# Altium footprint library 74系列芯片.PcbLib: 44 footprints (part 2 of 3)
Each footprint in its own frame and in the unit in brackets; x right, y up, seen from the top. Pads: shape width x height; smd on the part's side, far side on the other; paste and mask are expansions set on the pad; w line width, h text height; cw(c..) or ccw(c..) is an arc to the next point about the centre after c.
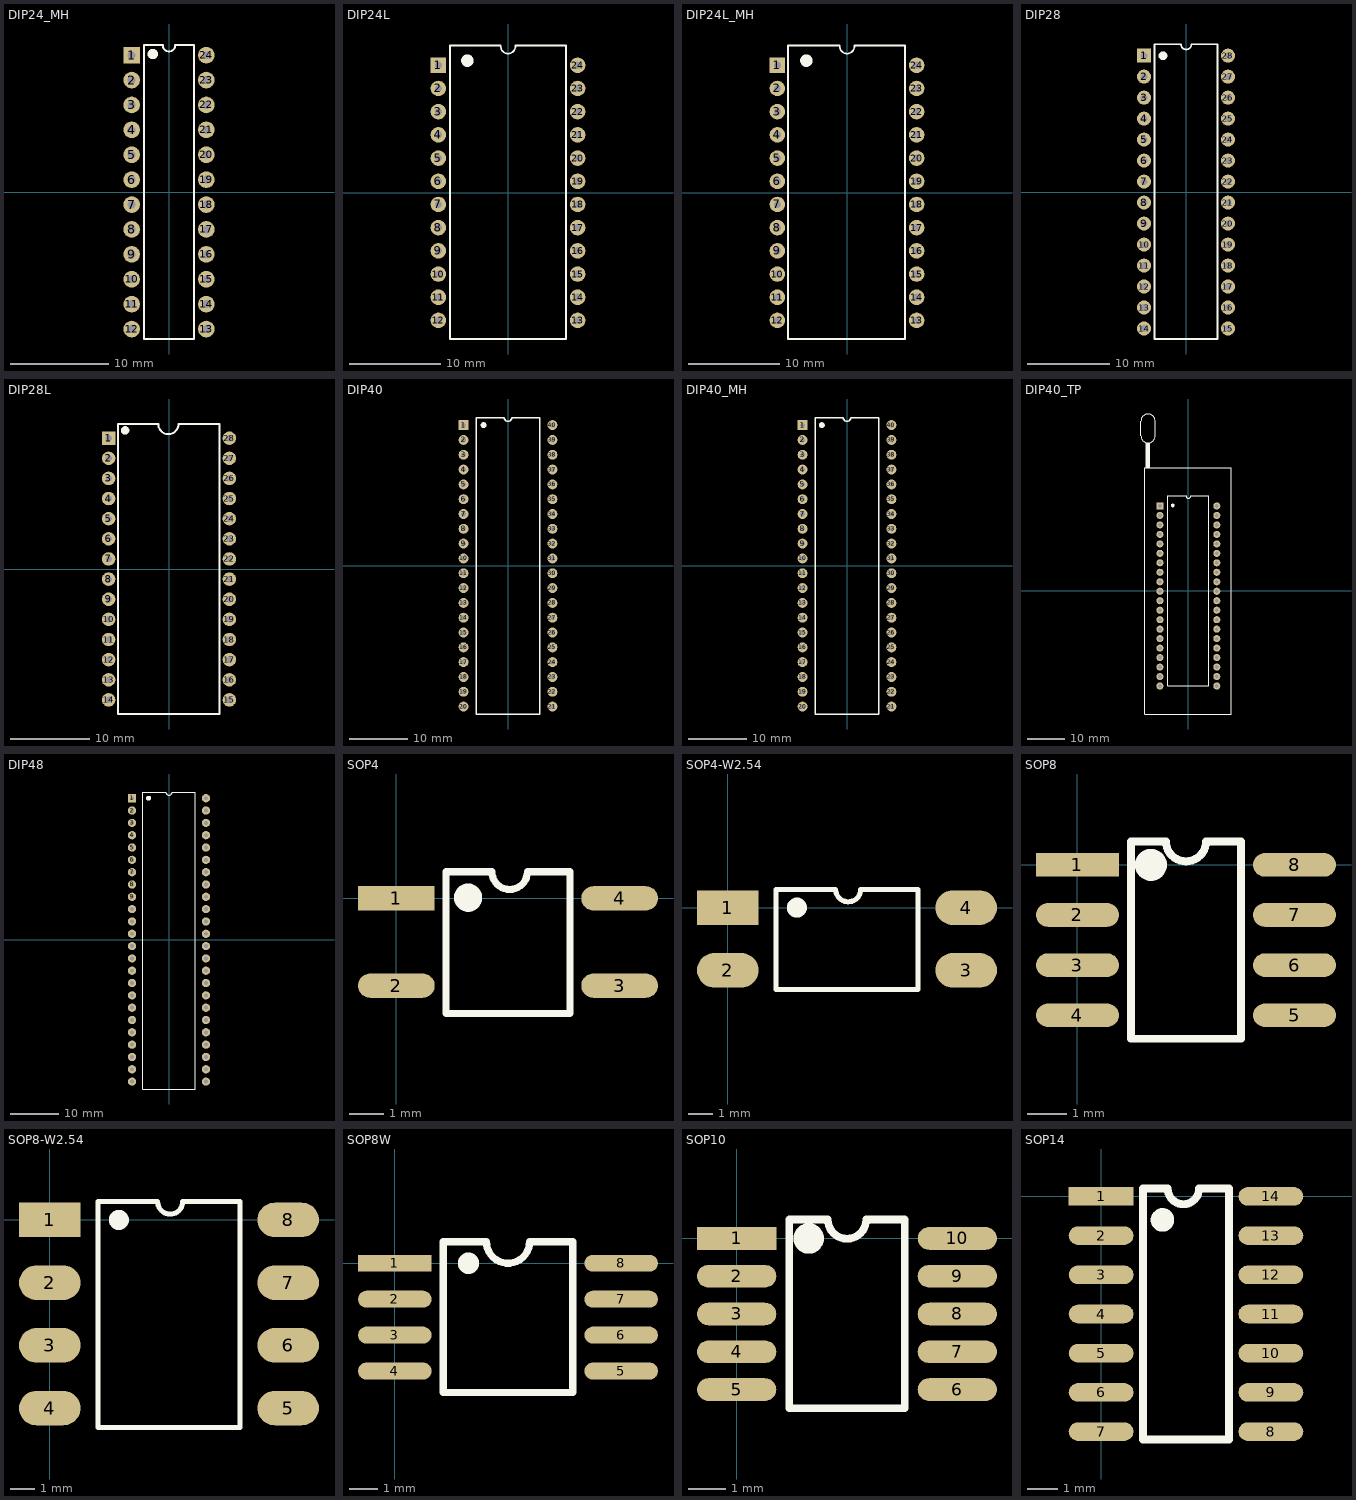
[diagram p1: the footprints below, top view; thin cyan lines are the x and y axes]

## DIP24_MH [mm]
pads (24):
  rect 1.7x1.7 hole 0.8: 1(-3.81,13.97)
  round 1.7 hole 0.8: 2(-3.81,11.43) 3(-3.81,8.89) 4(-3.81,6.35) 5(-3.81,3.81) 6(-3.81,1.27) 7(-3.81,-1.27) 8(-3.81,-3.81) 9(-3.81,-6.35) 10(-3.81,-8.89) 11(-3.81,-11.43) 12(-3.81,-13.97) 13(3.81,-13.97) 14(3.81,-11.43) 15(3.81,-8.89) 16(3.81,-6.35) 17(3.81,-3.81) 18(3.81,-1.27) 19(3.81,1.27) 20(3.81,3.81) 21(3.81,6.35) 22(3.81,8.89) 23(3.81,11.43) 24(3.81,13.97)
Top Overlay:
  circle w0.8: c-1.651,14.086 r0.127
  lines w0.2: -2.54,-14.986 2.54,-14.986 2.54,14.986 0.635,14.986 cw(c0,14.986) -0.635,14.986 -2.54,14.986 -2.54,-14.986
3D body "DIP24.STEP": height 7.85, standoff 0.04, extent -4,-15.633 4,15.367
3D body "DIP24_MH.STEP": height 4.95, standoff -3.05, extent -5.025,-15.506 5.025,15.494

## DIP24L [mm]
pads (24):
  rect 1.7x1.7 hole 0.8: 1(-7.62,13.97)
  round 1.7 hole 0.8: 2(-7.62,11.43) 3(-7.62,8.89) 4(-7.62,6.35) 5(-7.62,3.81) 6(-7.62,1.27) 7(-7.62,-1.27) 8(-7.62,-3.81) 9(-7.62,-6.35) 10(-7.62,-8.89) 11(-7.62,-11.43) 12(-7.62,-13.97) 13(7.62,-13.97) 14(7.62,-11.43) 15(7.62,-8.89) 16(7.62,-6.35) 17(7.62,-3.81) 18(7.62,-1.27) 19(7.62,1.27) 20(7.62,3.81) 21(7.62,6.35) 22(7.62,8.89) 23(7.62,11.43) 24(7.62,13.97)
Top Overlay:
  circle w1: c-4.445,14.478 r0.18
  lines w0.2: -0.796,16.121 ccw(c0.004,16.044) 0.803,16.134 ; -0.796,16.14 -6.35,16.14 -6.35,-16.002 6.35,-16.002 6.35,16.14 0.803,16.14
3D body "DIP24L.STEP": height 4.75, standoff -3.05, extent -7.713,-16.244 7.747,16.256

## DIP24L_MH [mm]
pads (24):
  rect 1.7x1.7 hole 0.8: 1(-7.62,13.97)
  round 1.7 hole 0.8: 2(-7.62,11.43) 3(-7.62,8.89) 4(-7.62,6.35) 5(-7.62,3.81) 6(-7.62,1.27) 7(-7.62,-1.27) 8(-7.62,-3.81) 9(-7.62,-6.35) 10(-7.62,-8.89) 11(-7.62,-11.43) 12(-7.62,-13.97) 13(7.62,-13.97) 14(7.62,-11.43) 15(7.62,-8.89) 16(7.62,-6.35) 17(7.62,-3.81) 18(7.62,-1.27) 19(7.62,1.27) 20(7.62,3.81) 21(7.62,6.35) 22(7.62,8.89) 23(7.62,11.43) 24(7.62,13.97)
Top Overlay:
  circle w1: c-4.445,14.478 r0.18
  lines w0.2: -0.796,16.121 ccw(c0.004,16.044) 0.803,16.134 ; -0.796,16.14 -6.46,16.14 -6.46,-16.002 6.35,-16.002 6.35,16.14 0.803,16.14
3D body "DIP24L.STEP": height 8.56, standoff 0.76, extent -7.73,-16.371 7.73,16.129
3D body "DIP24L_MH.STEP": height 4.95, standoff -3.05, extent -8.845,-15.506 8.845,15.494

## DIP28 [mm]
pads (28):
  rect 1.7x1.7 hole 0.8: 1(-5.08,16.51)
  round 1.7 hole 0.8: 2(-5.08,13.97) 3(-5.08,11.43) 4(-5.08,8.89) 5(-5.08,6.35) 6(-5.08,3.81) 7(-5.08,1.27) 8(-5.08,-1.27) 9(-5.08,-3.81) 10(-5.08,-6.35) 11(-5.08,-8.89) 12(-5.08,-11.43) 13(-5.08,-13.97) 14(-5.08,-16.51) 15(5.08,-16.51) 16(5.08,-13.97) 17(5.08,-11.43) 18(5.08,-8.89) 19(5.08,-6.35) 20(5.08,-3.81) 21(5.08,-1.27) 22(5.08,1.27) 23(5.08,3.81) 24(5.08,6.35) 25(5.08,8.89) 26(5.08,11.43) 27(5.08,13.97) 28(5.08,16.51)
Top Overlay:
  circle w0.8: c-2.794,16.51 r0.127
  lines w0.2: -3.81,-17.78 -3.81,17.893 -0.61,17.893 ccw(c0.025,17.893) 0.66,17.893 3.81,17.893 3.81,-17.78 -3.81,-17.78
3D body "DIP28.STEP": height 4.5, standoff -3.4, extent -5.153,-18.093 5.407,17.907

## DIP28L [mm]
pads (28):
  rect 1.7x1.7 hole 0.8: 1(-7.62,16.51)
  round 1.7 hole 0.8: 2(-7.62,13.97) 3(-7.62,11.43) 4(-7.62,8.89) 5(-7.62,6.35) 6(-7.62,3.81) 7(-7.62,1.27) 8(-7.62,-1.27) 9(-7.62,-3.81) 10(-7.62,-6.35) 11(-7.62,-8.89) 12(-7.62,-11.43) 13(-7.62,-13.97) 14(-7.62,-16.51) 15(7.62,-16.51) 16(7.62,-13.97) 17(7.62,-11.43) 18(7.62,-8.89) 19(7.62,-6.35) 20(7.62,-3.81) 21(7.62,-1.27) 22(7.62,1.27) 23(7.62,3.81) 24(7.62,6.35) 25(7.62,8.89) 26(7.62,11.43) 27(7.62,13.97) 28(7.62,16.51)
Top Overlay:
  circle w0.8: c-5.537,17.49 r0.127
  lines w0.254: -6.46,18.277 -6.46,-18.288 6.35,-18.288 6.35,18.288 1.185,18.288 cw(c-0.085,18.288) -1.355,18.288 -6.435,18.288
3D body "DIP28.STEP": height 4.7, standoff -3.2, extent -7.78,-18.631 7.78,18.669

## DIP40 [mm]
pads (40):
  rect 1.7x1.7 hole 0.8: 1(-7.62,24.13)
  round 1.7 hole 0.8: 2(-7.62,21.59) 3(-7.62,19.05) 4(-7.62,16.51) 5(-7.62,13.97) 6(-7.62,11.43) 7(-7.62,8.89) 8(-7.62,6.35) 9(-7.62,3.81) 10(-7.62,1.27) 11(-7.62,-1.27) 12(-7.62,-3.81) 13(-7.62,-6.35) 14(-7.62,-8.89) 15(-7.62,-11.43) 16(-7.62,-13.97) 17(-7.62,-16.51) 18(-7.62,-19.05) 19(-7.62,-21.59) 20(-7.62,-24.13) 21(7.62,-24.13) 22(7.62,-21.59) 23(7.62,-19.05) 24(7.62,-16.51) 25(7.62,-13.97) 26(7.62,-11.43) 27(7.62,-8.89) 28(7.62,-6.35) 29(7.62,-3.81) 30(7.62,-1.27) 31(7.62,1.27) 32(7.62,3.81) 33(7.62,6.35) 34(7.62,8.89) 35(7.62,11.43) 36(7.62,13.97) 37(7.62,16.51) 38(7.62,19.05) 39(7.62,21.59) 40(7.62,24.13)
Top Overlay:
  circle w0.508: c-4.191,24.13 r0.254
  lines w0.254: -5.461,-25.4 5.461,-25.4 5.461,25.4 0.635,25.4 cw(c0,25.4) -0.635,25.4 -5.461,25.4 -5.461,-25.4
3D body "DIP40.STEP": height 4.7, standoff -3.2, extent -7.907,-26.191 7.653,26.162

## DIP40_MH [mm]
pads (40):
  rect 1.7x1.7 hole 0.8: 1(-7.62,24.13)
  round 1.7 hole 0.8: 2(-7.62,21.59) 3(-7.62,19.05) 4(-7.62,16.51) 5(-7.62,13.97) 6(-7.62,11.43) 7(-7.62,8.89) 8(-7.62,6.35) 9(-7.62,3.81) 10(-7.62,1.27) 11(-7.62,-1.27) 12(-7.62,-3.81) 13(-7.62,-6.35) 14(-7.62,-8.89) 15(-7.62,-11.43) 16(-7.62,-13.97) 17(-7.62,-16.51) 18(-7.62,-19.05) 19(-7.62,-21.59) 20(-7.62,-24.13) 21(7.62,-24.13) 22(7.62,-21.59) 23(7.62,-19.05) 24(7.62,-16.51) 25(7.62,-13.97) 26(7.62,-11.43) 27(7.62,-8.89) 28(7.62,-6.35) 29(7.62,-3.81) 30(7.62,-1.27) 31(7.62,1.27) 32(7.62,3.81) 33(7.62,6.35) 34(7.62,8.89) 35(7.62,11.43) 36(7.62,13.97) 37(7.62,16.51) 38(7.62,19.05) 39(7.62,21.59) 40(7.62,24.13)
Top Overlay:
  circle w0.508: c-4.318,24.13 r0.254
  lines w0.254: -5.461,-25.4 -5.461,25.4 -0.635,25.4 ccw(c0,25.4) 0.635,25.4 5.461,25.4 5.461,-25.4 -5.461,-25.4
3D body "DIP40.STEP": height 8.51, standoff 0.61, extent -7.907,-26.191 7.653,26.162
3D body "DIP40_MH.STEP": height 5.2, standoff -3, extent -9.027,-25.327 8.773,25.273

## DIP40_TP [mm]
pads (40):
  rect 1.9x1.9 hole 1: 1(-7.62,22.733)
  round 1.9 hole 1: 2(-7.62,20.193) 3(-7.62,17.653) 4(-7.62,15.113) 5(-7.62,12.573) 6(-7.62,10.033) 7(-7.62,7.493) 8(-7.62,4.953) 9(-7.62,2.413) 10(-7.62,-0.127) 11(-7.62,-2.667) 12(-7.62,-5.207) 13(-7.62,-7.747) 14(-7.62,-10.287) 15(-7.62,-12.827) 16(-7.62,-15.367) 17(-7.62,-17.907) 18(-7.62,-20.447) 19(-7.62,-22.987) 20(-7.62,-25.527) 21(7.62,-25.527) 22(7.62,-22.987) 23(7.62,-20.447) 24(7.62,-17.907) 25(7.62,-15.367) 26(7.62,-12.827) 27(7.62,-10.287) 28(7.62,-7.747) 29(7.62,-5.207) 30(7.62,-2.667) 31(7.62,-0.127) 32(7.62,2.413) 33(7.62,4.953) 34(7.62,7.493) 35(7.62,10.033) 36(7.62,12.573) 37(7.62,15.113) 38(7.62,17.653) 39(7.62,20.193) 40(7.62,22.733)
Top Overlay:
  circle w0.508: c-4.191,22.86 r0.254
  lines w0.254: -11.303,33.02 -11.303,39.624 ; -11.049,33.02 -11.049,39.624 ; -10.922,33.147 -10.922,39.497 ; -10.668,33.02 -10.668,39.624 ; -10.414,33.02 -10.414,39.624 ; -12.7,41.529 ccw(c-10.795,41.529) -8.89,41.529 -8.89,45.466 ccw(c-10.795,45.466) -12.7,45.466 -12.7,41.529 ; -11.684,-33.02 11.43,-33.02 11.43,33.02 -11.684,33.02 -11.684,-33.02 ; -5.461,-25.4 5.461,-25.4 5.461,25.4 0.635,25.4 cw(c0,25.4) -0.635,25.4 -5.461,25.4 -5.461,-25.4
3D body "DIP40.STEP": height 16.64, standoff 8.73, extent -7.907,-28.096 7.653,24.257
3D body "DIP40_TP.STEP": height 11.65, standoff -3.15, extent -12.847,-32.707 11.303,47.693

## DIP48 [mm]
pads (48):
  rect 1.7x1.7 hole 0.8: 1(-7.62,29.21)
  round 1.7 hole 0.8: 2(-7.62,26.67) 3(-7.62,24.13) 4(-7.62,21.59) 5(-7.62,19.05) 6(-7.62,16.51) 7(-7.62,13.97) 8(-7.62,11.43) 9(-7.62,8.89) 10(-7.62,6.35) 11(-7.62,3.81) 12(-7.62,1.27) 13(-7.62,-1.27) 14(-7.62,-3.81) 15(-7.62,-6.35) 16(-7.62,-8.89) 17(-7.62,-11.43) 18(-7.62,-13.97) 19(-7.62,-16.51) 20(-7.62,-19.05) 21(-7.62,-21.59) 22(-7.62,-24.13) 23(-7.62,-26.67) 24(-7.62,-29.21) 25(7.62,-29.21) 26(7.62,-26.67) 27(7.62,-24.13) 28(7.62,-21.59) 29(7.62,-19.05) 30(7.62,-16.51) 31(7.62,-13.97) 32(7.62,-11.43) 33(7.62,-8.89) 34(7.62,-6.35) 35(7.62,-3.81) 36(7.62,-1.27) 37(7.62,1.27) 38(7.62,3.81) 39(7.62,6.35) 40(7.62,8.89) 41(7.62,11.43) 42(7.62,13.97) 43(7.62,16.51) 44(7.62,19.05) 45(7.62,21.59) 46(7.62,24.13) 47(7.62,26.67) 48(7.62,29.21)
Top Overlay:
  circle w0.508: c-4.191,29.21 r0.254
  lines w0.254: -5.461,-30.734 5.461,-30.734 5.461,30.48 0.635,30.48 cw(c0,30.48) -0.635,30.48 -5.461,30.48 -5.461,-30.734
3D body "DIP48.STEP": height 4.7, standoff -3.2, extent -7.902,-30.756 7.648,30.734

## SOP4 [mm]
pads (4):
  rect 2.2x0.7 smd: 1(0,0)
  oval 2.2x0.7 smd: 2(0,-2.5) 3(6.4,-2.5) 4(6.4,0)
Top Overlay:
  circle w0.5: c2.057,0.02 r0.155
  lines w0.2: 1.422,0.762 1.422,-3.302 4.978,-3.302 4.978,0.762
  lines w0.203: 1.422,0.762 2.74,0.762 ccw(c3.248,0.762) 3.248,0.254 ccw(c3.248,0.762) 3.756,0.762 4.978,0.762
3D body "SOP4.STEP": height 1.9, standoff 0, extent -0.101,-3.429 6.705,0.871

## SOP4-W2.54 [mm]
pads (4):
  rect 2.5x1.4 smd: 1(0,0)
  oval 2.5x1.4 smd: 2(0,-2.54) 3(9.652,-2.54) 4(9.652,0)
Top Overlay:
  circle w0.5: c2.794,0 r0.155
  lines w0.2: 1.956,0.742 1.956,-3.322 7.696,-3.322 7.696,0.742
  lines w0.203: 1.956,0.742 4.366,0.742 ccw(c4.874,0.742) 4.874,0.234 ccw(c4.874,0.742) 5.382,0.742 7.696,0.742
3D body "SOP4-W2.54.STEP": height 3.83, standoff -0.02, extent -0.047,-3.564 9.953,1.016

## SOP8 [mm]
pads (8):
  rect 2.1x0.6 smd: 1(0,0)
  oval 2.1x0.6 smd: 2(0,-1.27) 3(0,-2.54) 4(0,-3.81) 5(5.5,-3.81) 6(5.5,-2.54) 7(5.5,-1.27) 8(5.5,0)
Top Overlay:
  circle w0.5: c1.861,0 r0.155
  lines w0.2: 1.353,0.595 1.353,-4.405 4.147,-4.405 4.147,0.595
  lines w0.203: 1.353,0.595 2.242,0.595 ccw(c2.75,0.595) 2.75,0.087 ccw(c2.75,0.595) 3.258,0.595 4.147,0.595
3D body "SOP8.STEP": height 1.9, standoff 0, extent -0.209,-4.405 5.797,0.595

## SOP8-W2.54 [mm]
pads (8):
  rect 2.5x1.4 smd: 1(0,0)
  oval 2.5x1.4 smd: 2(0,-2.54) 3(0,-5.08) 4(0,-7.62) 5(9.652,-7.62) 6(9.652,-5.08) 7(9.652,-2.54) 8(9.652,0)
Top Overlay:
  circle w0.5: c2.794,0 r0.155
  lines w0.2: 1.956,0.742 1.956,-8.402 7.696,-8.402 7.696,0.742
  lines w0.203: 1.956,0.742 4.366,0.742 ccw(c4.874,0.742) 4.874,0.234 ccw(c4.874,0.742) 5.382,0.742 7.696,0.742
3D body "SOP8-W2.54.STEP": height 3.82, standoff -0.03, extent -0.174,-8.64 9.826,1.02

## SOP8W [mm]
pads (8):
  rect 2.6x0.6 smd: 1(0,0)
  oval 2.6x0.6 smd: 2(0,-1.27) 3(0,-2.54) 4(0,-3.81) 5(8,-3.81) 6(8,-2.54) 7(8,-1.27) 8(8,0)
Top Overlay:
  circle w0.5: c2.603,0 r0.127
  lines w0.254: 1.714,-4.572 6.286,-4.572 6.286,0.762 4.762,0.762 cw(c4,0.762) 3.238,0.762 1.714,0.762 1.714,-4.572
3D body "SOP8W.STEP": height 1.9, standoff 0, extent 0.248,-4.572 8.134,0.708

## SOP10 [mm]
height 1.75
pads (10):
  rect 2.1x0.6 smd: 1(0,0)
  oval 2.1x0.6 smd: 2(0,-1) 3(0,-2) 4(0,-3) 5(0,-4) 6(5.842,-4) 7(5.842,-3) 8(5.842,-2) 9(5.842,-1) 10(5.842,0)
Top Overlay:
  circle w0.5: c1.905,0 r0.155
  lines w0.2: 1.397,0.5 1.397,-4.5 4.445,-4.5 4.445,0.5
  lines w0.203: 1.397,0.5 2.413,0.5 ccw(c2.921,0.5) 2.921,-0.008 ccw(c2.921,0.5) 3.429,0.5 4.445,0.5
3D body "SOP10.STEP": height 1.55, standoff -0.05, extent -0.209,-4.482 5.797,0.418

## SOP14 [mm]
pads (14):
  rect 2.1x0.6 smd: 1(0,0)
  oval 2.1x0.6 smd: 2(0,-1.27) 3(0,-2.54) 4(0,-3.81) 5(0,-5.08) 6(0,-6.35) 7(0,-7.62) 8(5.5,-7.62) 9(5.5,-6.35) 10(5.5,-5.08) 11(5.5,-3.81) 12(5.5,-2.54) 13(5.5,-1.27) 14(5.5,0)
Top Overlay:
  circle w0.508: c1.988,-0.762 r0.127
  lines w0.254: 1.353,-7.874 4.147,-7.874 4.147,0.254 3.173,0.254 cw(c2.665,0.254) 2.665,-0.254 cw(c2.665,0.254) 2.157,0.254 1.353,0.254 1.353,-7.874
3D body "SOP14.STEP": height 1.9, standoff 0, extent -0.254,-8.16 5.752,0.54